# EAGLE library part 750319690 (library 750319690)
WE-PPTI Push-Pull Transformer TOR6/3/3 SMT; Ui = 12V; Uo1 = 5V/0.7A; f = 400-600kHz Source: Datasheet <https://www.we-online.com/components/products/datasheet/750319690.pdf>
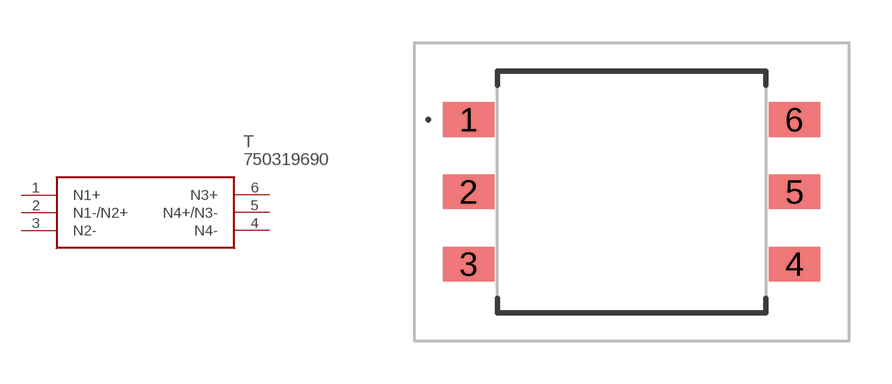
[diagram p0: symbol with the pads of 750319690; footprint 750319690]

Designator prefix T

## 750319690 (Description: WE-PPTI Push-Pull Transformer TOR6/3/3 SMT; Ui = 12V; Uo1 = 5V/0.7A; f = 400-600kHz; Height: 5.5mm; Manufacturer_Name: Wurth Elektronik; Manufacturer_Part_Number: 750319690; Mouser_Part_Number: 710-750319690; Mouser_Price-Stock: https://www.mouser.co.uk/ProductDetail/Wurth-Elektronik/750319690?qs=1Kr7Jg1SGW%2Fxuc9sXU4Xvg%3D%3D)  [750319690]
1  N1+
2  N1-/N2+
3  N2-
4  N4-
5  N4+/N3-
6  N3+

## Footprint 750319690 (pad centres in mm)
750319690-2
smd 1.82 x 1.22: 1 -5.725,2.54; 2 -5.725,0; 3 -5.725,-2.54; 4 5.725,-2.54; 5 5.725,0; 6 5.725,2.54